# Altium schematic symbol library Pads.SchLib: 1 symbol
Pins are listed as number, name and electrical type; pins without a type are passive.

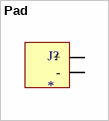
[diagram p0: symbol Pad]

## Pad
designator J?
footprint PCBComponent_1
pins: 1 +, 2 -